# Altium footprint library clusterhead.PcbLib: 75 footprints (part 3 of 5)
Each footprint in its own frame and in the unit in brackets; x right, y up, seen from the top. Pads: shape width x height; smd on the part's side, far side on the other; paste and mask are expansions set on the pad; w line width, h text height; cw(c..) or ccw(c..) is an arc to the next point about the centre after c.
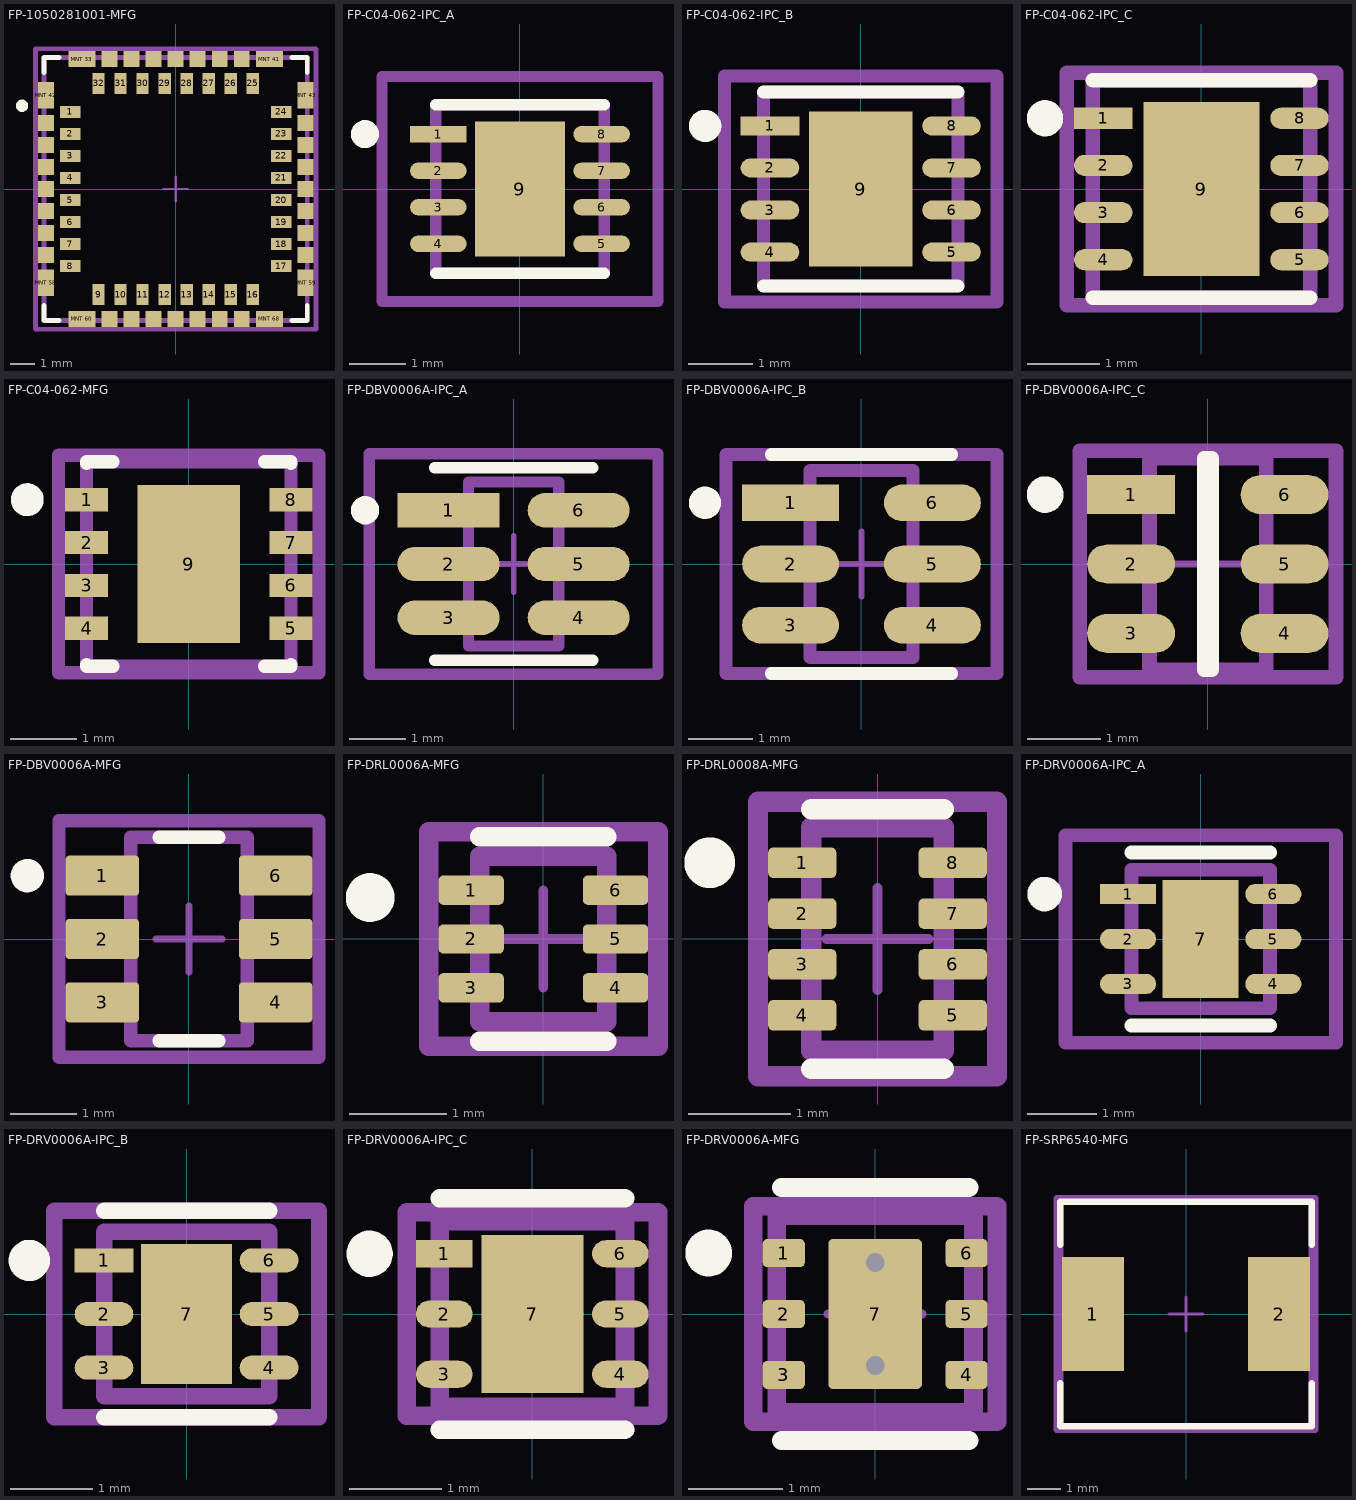
[diagram p2: the footprints below, top view; thin cyan lines are the x and y axes]

## FP-1050281001-MFG [mm]
pads (68):
  rect 0.84x0.5 smd paste+0 mask+0: 1(-4.31,3.15) 2(-4.31,2.25) 3(-4.31,1.35) 4(-4.31,0.45) 5(-4.31,-0.45) 6(-4.31,-1.35) 7(-4.31,-2.25) 8(-4.31,-3.15) 17(4.31,-3.15) 18(4.31,-2.25) 19(4.31,-1.35) 20(4.31,-0.45) 21(4.31,0.45) 22(4.31,1.35) 23(4.31,2.25) 24(4.31,3.15)
  rect 0.5x0.84 smd paste+0 mask+0: 9(-3.15,-4.31) 10(-2.25,-4.31) 11(-1.35,-4.31) 12(-0.45,-4.31) 13(0.45,-4.31) 14(1.35,-4.31) 15(2.25,-4.31) 16(3.15,-4.31) 25(3.15,4.31) 26(2.25,4.31) 27(1.35,4.31) 28(0.45,4.31) 29(-0.45,4.31) 30(-1.35,4.31) 31(-2.25,4.31) 32(-3.15,4.31)
  rect 1.1x0.65 smd paste+0 mask+0: "MNT 33"(-3.83,5.305) "MNT 41"(3.83,5.305) "MNT 60"(-3.83,-5.305) "MNT 68"(3.83,-5.305)
  rect 0.65x0.65 smd paste+0 mask+0: "MNT 34"(-2.7,5.305) "MNT 35"(-1.8,5.305) "MNT 36"(-0.9,5.305) "MNT 37"(0,5.305) "MNT 38"(0.9,5.305) "MNT 39"(1.8,5.305) "MNT 40"(2.7,5.305) "MNT 44"(-5.305,2.7) "MNT 45"(5.305,2.7) "MNT 46"(-5.305,1.8) "MNT 47"(5.305,1.8) "MNT 48"(-5.305,0.9) "MNT 49"(5.305,0.9) "MNT 50"(-5.305,0) "MNT 51"(5.305,0) "MNT 52"(-5.305,-0.9) "MNT 53"(5.305,-0.9) "MNT 54"(-5.305,-1.8) "MNT 55"(5.305,-1.8) "MNT 56"(-5.305,-2.7) "MNT 57"(5.305,-2.7) "MNT 61"(-2.7,-5.305) "MNT 62"(-1.8,-5.305) "MNT 63"(-0.9,-5.305) "MNT 64"(0,-5.305) "MNT 65"(0.9,-5.305) "MNT 66"(1.8,-5.305) "MNT 67"(2.7,-5.305)
  rect 0.65x1.1 smd paste+0 mask+0: "MNT 42"(-5.305,3.83) "MNT 43"(5.305,3.83) "MNT 58"(-5.305,-3.83) "MNT 59"(5.305,-3.83)
Top Overlay:
  circle w0.25: c-6.275,3.4 r0.125
  lines w0.2: -5.375,-4.755 -5.375,-5.375 -4.755,-5.375 ; -5.375,4.755 -5.375,5.375 -4.755,5.375 ; 4.755,-5.375 5.375,-5.375 5.375,-4.755 ; 4.755,5.375 5.375,5.375 5.375,4.755
Top Courtyard:
  lines w0.2: -5.73,-5.73 -5.73,5.73 5.73,5.73 5.73,-5.73 -5.73,-5.73
Top 3D Body:
  lines w0.2: -5.375,-5.375 -5.375,5.375 5.375,5.375 5.375,-5.375 -5.375,-5.375
Top Assembly:
  lines w0.2: -5.73,-5.73 -5.73,5.73 5.73,5.73 5.73,-5.73 -5.73,-5.73
  text ".Designator" at 0,0.188 h1
Top Component Center:
  lines w0.1: -0.5,0 0.5,0 ; 0,-0.5 0,0.5
3D body "Conn_Molex_1050281001_eec.STEP": height 0.25, standoff 0, extent -5.73,-5.73 5.73,5.73

## FP-C04-062-IPC_A [mm]
pads (9):
  rect 1.006x0.292 smd paste+0 mask+0: 1(-1.453,0.975)
  rrect100% 1.006x0.292 smd paste+0 mask+0: 2(-1.453,0.325) 3(-1.453,-0.325) 4(-1.453,-0.975) 5(1.453,-0.975) 6(1.453,-0.325) 7(1.453,0.325) 8(1.453,0.975)
  rect 1.6x2.4 smd paste-1000 mask+0: 9(0,0)
Top Overlay:
  circle w0.25: c-2.756,0.975 r0.125
  lines w0.2: -1.5,-1.5 1.5,-1.5 ; -1.5,1.5 1.5,1.5
Top Paste:
  rectangle: -0.451,-0.851 0.451,0.851
Top Courtyard:
  lines w0.2: -2.456,-2 -2.456,2 2.456,2 2.456,-2 -2.456,-2
Top 3D Body:
  lines w0.2: -1.5,-1.5 -1.5,1.5 1.5,1.5 1.5,-1.5 -1.5,-1.5
Top Assembly:
  lines w0.2: -2.456,-2 -2.456,2 2.456,2 2.456,-2 -2.456,-2
  text ".Designator" at 0,0 h1
Top Component Center:
  lines w0.1: -0.5,0 0.5,0 ; 0,-0.5 0,0.5
3D body "IC_Microchip_Technology_MCP2544FDT-H-MF_eec.STEP": height 0.25, standoff 0, extent -2.456,-2 2.456,2

## FP-C04-062-IPC_B [mm]
pads (9):
  rect 0.906x0.292 smd paste+0 mask+0: 1(-1.403,0.975)
  rrect100% 0.906x0.292 smd paste+0 mask+0: 2(-1.403,0.325) 3(-1.403,-0.325) 4(-1.403,-0.975) 5(1.403,-0.975) 6(1.403,-0.325) 7(1.403,0.325) 8(1.403,0.975)
  rect 1.6x2.4 smd paste-1000 mask+0: 9(0,0)
Top Overlay:
  circle w0.25: c-2.406,0.975 r0.125
  lines w0.2: -1.5,-1.5 1.5,-1.5 ; -1.5,1.5 1.5,1.5
Top Paste:
  rectangle: -0.451,-0.851 0.451,0.851
Top Courtyard:
  lines w0.2: -2.106,-1.75 2.106,-1.75 2.106,1.75 -2.106,1.75 -2.106,-1.75
Top 3D Body:
  lines w0.2: -1.5,-1.5 1.5,-1.5 1.5,1.5 -1.5,1.5 -1.5,-1.5
Top Assembly:
  lines w0.2: -2.106,-1.75 2.106,-1.75 2.106,1.75 -2.106,1.75 -2.106,-1.75
  text ".Designator" at 0,0 h1
Top Component Center:
  lines w0.1: -0.5,0 0.5,0 ; 0,-0.5 0,0.5
3D body "IC_Microchip_Technology_MCP2544FDT-H-MF_eec.STEP": height 0.25, standoff 0, extent -2.106,-1.75 2.106,1.75

## FP-C04-062-IPC_C [mm]
pads (9):
  rect 0.806x0.292 smd paste+0 mask+0: 1(-1.353,0.975)
  rrect100% 0.806x0.292 smd paste+0 mask+0: 2(-1.353,0.325) 3(-1.353,-0.325) 4(-1.353,-0.975) 5(1.353,-0.975) 6(1.353,-0.325) 7(1.353,0.325) 8(1.353,0.975)
  rect 1.6x2.4 smd paste-1000 mask+0: 9(0,0)
Top Overlay:
  circle w0.25: c-2.156,0.975 r0.125
  lines w0.2: -1.5,-1.5 1.5,-1.5 ; -1.5,1.5 1.5,1.5
Top Paste:
  rectangle: -0.451,-0.851 0.451,0.851
Top Courtyard:
  lines w0.2: -1.856,-1.6 1.856,-1.6 1.856,1.6 -1.856,1.6 -1.856,-1.6
Top 3D Body:
  lines w0.2: -1.5,-1.5 1.5,-1.5 1.5,1.5 -1.5,1.5 -1.5,-1.5
Top Assembly:
  lines w0.2: -1.856,-1.6 1.856,-1.6 1.856,1.6 -1.856,1.6 -1.856,-1.6
  text ".Designator" at 0,0 h1
Top Component Center:
  lines w0.1: -0.5,0 0.5,0 ; 0,-0.5 0,0.5
3D body "IC_Microchip_Technology_MCP2544FDT-H-MF_eec.STEP": height 0.25, standoff 0, extent -1.856,-1.6 1.856,1.6

## FP-C04-062-MFG [mm]
pads (9):
  rect 0.65x0.35 smd paste+0 mask+0: 1(-1.55,0.975) 2(-1.55,0.325) 3(-1.55,-0.325) 4(-1.55,-0.975) 5(1.55,-0.975) 6(1.55,-0.325) 7(1.55,0.325) 8(1.55,0.975)
  rect 1.55x2.4 smd paste+0 mask+0: 9(0,0)
Top Overlay:
  circle w0.25: c-2.45,0.975 r0.125
  lines w0.2: -1.55,-1.525 -1.55,-1.55 -1.15,-1.55 ; -1.55,1.525 -1.55,1.55 -1.15,1.55 ; 1.15,-1.55 1.55,-1.55 1.55,-1.525 ; 1.15,1.55 1.55,1.55 1.55,1.525
Top Courtyard:
  lines w0.2: -1.975,-1.65 1.975,-1.65 1.975,1.65 -1.975,1.65 -1.975,-1.65
Top 3D Body:
  lines w0.2: -1.55,-1.55 1.55,-1.55 1.55,1.55 -1.55,1.55 -1.55,-1.55
Top Assembly:
  lines w0.2: -1.975,-1.65 1.975,-1.65 1.975,1.65 -1.975,1.65 -1.975,-1.65
  text ".Designator" at 0,0.188 h1
Top Component Center:
  lines w0.1: -0.5,0 0.5,0 ; 0,-0.5 0,0.5
3D body "IC_Microchip_Technology_MCP2544FDT-H-MF_eec.STEP": height 0.25, standoff 0, extent -1.975,-1.65 1.975,1.65

## FP-DBV0006A-IPC_A [mm]
pads (6):
  rect 1.805x0.61 smd paste+0 mask+0: 1(-1.15,0.95)
  rrect100% 1.805x0.61 smd paste+0 mask+0: 2(-1.15,0) 3(-1.15,-0.95) 4(1.15,-0.95) 5(1.15,0) 6(1.15,0.95)
Top Overlay:
  circle w0.25: c-2.628,0.95 r0.125
  lines w0.2: -1.4,-1.7 1.4,-1.7 ; -1.4,1.7 1.4,1.7
Top Courtyard:
  lines w0.2: -2.553,-1.95 -2.553,1.95 2.553,1.95 2.553,-1.95 -2.553,-1.95
Top 3D Body:
  lines w0.2: -0.8,-1.45 -0.8,1.45 0.8,1.45 0.8,-1.45 -0.8,-1.45
Top Assembly:
  lines w0.2: -2.553,-1.95 -2.553,1.95 2.553,1.95 2.553,-1.95 -2.553,-1.95
  text ".Designator" at 0,0.188 h1
Top Component Center:
  lines w0.1: -0.5,0 0.5,0 ; 0,-0.5 0,0.5
3D body "IC_Texas_Instruments_SN74LVC1G97DBVR_eec.STEP": height 0.25, standoff 0, extent -2.553,-1.95 2.553,1.95

## FP-DBV0006A-IPC_B [mm]
pads (6):
  rect 1.505x0.57 smd paste+0 mask+0: 1(-1.1,0.95)
  rrect100% 1.505x0.57 smd paste+0 mask+0: 2(-1.1,0) 3(-1.1,-0.95) 4(1.1,-0.95) 5(1.1,0) 6(1.1,0.95)
Top Overlay:
  circle w0.25: c-2.428,0.95 r0.125
  lines w0.2: -1.4,-1.7 1.4,-1.7 ; -1.4,1.7 1.4,1.7
Top Courtyard:
  lines w0.2: -2.103,-1.7 2.103,-1.7 2.103,1.7 -2.103,1.7 -2.103,-1.7
Top 3D Body:
  lines w0.2: -0.8,-1.45 0.8,-1.45 0.8,1.45 -0.8,1.45 -0.8,-1.45
Top Assembly:
  lines w0.2: -2.103,-1.7 2.103,-1.7 2.103,1.7 -2.103,1.7 -2.103,-1.7
  text ".Designator" at 0,0.188 h1
Top Component Center:
  lines w0.1: -0.5,0 0.5,0 ; 0,-0.5 0,0.5
3D body "IC_Texas_Instruments_SN74LVC1G97DBVR_eec.STEP": height 0.25, standoff 0, extent -2.103,-1.7 2.103,1.7

## FP-DBV0006A-IPC_C [mm]
pads (6):
  rect 1.205x0.53 smd paste+0 mask+0: 1(-1.05,0.95)
  rrect100% 1.205x0.53 smd paste+0 mask+0: 2(-1.05,0) 3(-1.05,-0.95) 4(1.05,-0.95) 5(1.05,0) 6(1.05,0.95)
Top Overlay:
  circle w0.25: c-2.228,0.95 r0.125
  lines w0.2: -0.052,-1.45 -0.052,1.45 0.052,1.45 0.052,-1.45 -0.052,-1.45
Top Courtyard:
  lines w0.2: -1.753,-1.55 1.753,-1.55 1.753,1.55 -1.753,1.55 -1.753,-1.55
Top 3D Body:
  lines w0.2: -0.8,-1.45 0.8,-1.45 0.8,1.45 -0.8,1.45 -0.8,-1.45
Top Assembly:
  lines w0.2: -1.753,-1.55 1.753,-1.55 1.753,1.55 -1.753,1.55 -1.753,-1.55
  text ".Designator" at 0,0.188 h1
Top Component Center:
  lines w0.1: -0.5,0 0.5,0 ; 0,-0.5 0,0.5
3D body "IC_Texas_Instruments_SN74LVC1G97DBVR_eec.STEP": height 0.25, standoff 0, extent -1.753,-1.55 1.753,1.55

## FP-DBV0006A-MFG [mm]
pads (6):
  rrect17% 1.1x0.6 smd paste+0 mask+0: 1(-1.3,0.95) 2(-1.3,0) 3(-1.3,-0.95) 4(1.3,-0.95) 5(1.3,0) 6(1.3,0.95)
Top Overlay:
  circle w0.25: c-2.425,0.95 r0.125
  lines w0.2: -0.45,-1.525 0.45,-1.525 ; -0.45,1.525 0.45,1.525
Top Courtyard:
  lines w0.2: -1.95,-1.775 -1.95,1.775 1.95,1.775 1.95,-1.775 -1.95,-1.775
Top 3D Body:
  lines w0.2: -0.875,-1.525 -0.875,1.525 0.875,1.525 0.875,-1.525 -0.875,-1.525
Top Assembly:
  lines w0.2: -1.95,-1.775 -1.95,1.775 1.95,1.775 1.95,-1.775 -1.95,-1.775
  text ".Designator" at 0,0.188 h1
Top Component Center:
  lines w0.1: -0.5,0 0.5,0 ; 0,-0.5 0,0.5
3D body "IC_Texas_Instruments_SN74LVC1G97DBVR_eec.STEP": height 0.25, standoff 0, extent -1.95,-1.775 1.95,1.775

## FP-DRL0006A-MFG [mm]
pads (6):
  rrect33% 0.67x0.3 smd paste+0 mask+0: 1(-0.74,0.5) 2(-0.74,0) 3(-0.74,-0.5) 4(0.74,-0.5) 5(0.74,0) 6(0.74,0.5)
Top Overlay:
  circle w0.25: c-1.775,0.425 r0.125
  lines w0.2: -0.65,-1.05 0.65,-1.05 ; -0.65,1.05 0.65,1.05
Top Courtyard:
  lines w0.2: -1.175,-1.1 -1.175,1.1 1.175,1.1 1.175,-1.1 -1.175,-1.1
Top 3D Body:
  lines w0.2: -0.65,-0.85 -0.65,0.85 0.65,0.85 0.65,-0.85 -0.65,-0.85
Top Assembly:
  lines w0.2: -1.175,-1.1 -1.175,1.1 1.175,1.1 1.175,-1.1 -1.175,-1.1
  text ".Designator" at 0,0.188 h1
Top Component Center:
  lines w0.1: -0.5,0 0.5,0 ; 0,-0.5 0,0.5
3D body "Diode_Texas_Instruments_TPD2E1B06DRLR_eec.STEP": height 0.25, standoff 0, extent -1.175,-1.1 1.175,1.1

## FP-DRL0008A-MFG [mm]
pads (8):
  rrect33% 0.67x0.3 smd paste+0 mask+0: 1(-0.74,0.75) 2(-0.74,0.25) 3(-0.74,-0.25) 4(-0.74,-0.75) 5(0.74,-0.75) 6(0.74,-0.25) 7(0.74,0.25) 8(0.74,0.75)
Top Overlay:
  circle w0.25: c-1.65,0.75 r0.125
  lines w0.2: -0.65,-1.275 0.65,-1.275 ; -0.65,1.275 0.65,1.275
Top Courtyard:
  lines w0.2: -1.175,-1.35 -1.175,1.35 1.175,1.35 1.175,-1.35 -1.175,-1.35
Top 3D Body:
  lines w0.2: -0.65,-1.1 -0.65,1.1 0.65,1.1 0.65,-1.1 -0.65,-1.1
Top Assembly:
  lines w0.2: -1.175,-1.35 -1.175,1.35 1.175,1.35 1.175,-1.35 -1.175,-1.35
  text ".Designator" at 0,0.188 h1
Top Component Center:
  lines w0.1: -0.5,0 0.5,0 ; 0,-0.5 0,0.5
3D body "IC_Texas_Instruments_TPS628501QDRLRQ1_eec.STEP": height 0.25, standoff 0, extent -1.175,-1.35 1.175,1.35

## FP-DRV0006A-IPC_A [mm]
pads (7):
  rect 0.811x0.292 smd paste+0 mask+0: 1(-1.051,0.65)
  rrect100% 0.811x0.292 smd paste+0 mask+0: 2(-1.051,0) 3(-1.051,-0.65) 4(1.051,-0.65) 5(1.051,0) 6(1.051,0.65)
  rect 1.1x1.7 smd paste-1000 mask+0: 7(0,0)
Top Overlay:
  circle w0.25: c-2.256,0.65 r0.125
  lines w0.2: -1,-1.25 1,-1.25 ; -1,1.25 1,1.25
Top Paste:
  rectangle: -0.308,-0.608 0.308,0.608
Top Courtyard:
  lines w0.2: -1.956,-1.5 1.956,-1.5 1.956,1.5 -1.956,1.5 -1.956,-1.5
Top 3D Body:
  lines w0.2: -1,-1 1,-1 1,1 -1,1 -1,-1
Top Assembly:
  lines w0.2: -1.956,-1.5 1.956,-1.5 1.956,1.5 -1.956,1.5 -1.956,-1.5
  text ".Designator" at 0,0 h1
Top Component Center:
  lines w0.1: -0.5,0 0.5,0 ; 0,-0.5 0,0.5
3D body "IC_Texas_Instruments_LP5912Q3_3DRVRQ1_eec.STEP": height 0.25, standoff 0, extent -1.956,-1.5 1.956,1.5

## FP-DRV0006A-IPC_B [mm]
pads (7):
  rect 0.711x0.292 smd paste+0 mask+0: 1(-1.001,0.65)
  rrect100% 0.711x0.292 smd paste+0 mask+0: 2(-1.001,0) 3(-1.001,-0.65) 4(1.001,-0.65) 5(1.001,0) 6(1.001,0.65)
  rect 1.1x1.7 smd paste-1000 mask+0: 7(0,0)
Top Overlay:
  circle w0.25: c-1.906,0.65 r0.125
  lines w0.2: -1,-1.25 1,-1.25 ; -1,1.25 1,1.25
Top Paste:
  rectangle: -0.308,-0.608 0.308,0.608
Top Courtyard:
  lines w0.2: -1.606,-1.25 1.606,-1.25 1.606,1.25 -1.606,1.25 -1.606,-1.25
Top 3D Body:
  lines w0.2: -1,-1 1,-1 1,1 -1,1 -1,-1
Top Assembly:
  lines w0.2: -1.606,-1.25 1.606,-1.25 1.606,1.25 -1.606,1.25 -1.606,-1.25
  text ".Designator" at 0,0 h1
Top Component Center:
  lines w0.1: -0.5,0 0.5,0 ; 0,-0.5 0,0.5
3D body "IC_Texas_Instruments_LP5912Q3_3DRVRQ1_eec.STEP": height 0.25, standoff 0, extent -1.606,-1.25 1.606,1.25

## FP-DRV0006A-IPC_C [mm]
pads (7):
  rect 0.611x0.292 smd paste+0 mask+0: 1(-0.951,0.65)
  rrect100% 0.611x0.292 smd paste+0 mask+0: 2(-0.951,0) 3(-0.951,-0.65) 4(0.951,-0.65) 5(0.951,0) 6(0.951,0.65)
  rect 1.1x1.7 smd paste-1000 mask+0: 7(0,0)
Top Overlay:
  circle w0.25: c-1.756,0.65 r0.125
  lines w0.2: -1,-1.25 1,-1.25 ; -1,1.25 1,1.25
Top Paste:
  rectangle: -0.308,-0.608 0.308,0.608
Top Courtyard:
  lines w0.2: -1.356,-1.1 1.356,-1.1 1.356,1.1 -1.356,1.1 -1.356,-1.1
Top 3D Body:
  lines w0.2: -1,-1 1,-1 1,1 -1,1 -1,-1
Top Assembly:
  lines w0.2: -1.356,-1.1 1.356,-1.1 1.356,1.1 -1.356,1.1 -1.356,-1.1
  text ".Designator" at 0,0 h1
Top Component Center:
  lines w0.1: -0.5,0 0.5,0 ; 0,-0.5 0,0.5
3D body "IC_Texas_Instruments_LP5912Q3_3DRVRQ1_eec.STEP": height 0.25, standoff 0, extent -1.356,-1.1 1.356,1.1

## FP-DRV0006A-MFG [mm]
pads (7):
  rrect33% 0.45x0.3 smd paste+0 mask+0: 1(-0.975,0.65) 2(-0.975,0) 3(-0.975,-0.65) 4(0.975,-0.65) 5(0.975,0) 6(0.975,0.65)
  rrect10% 1x1.6 smd paste-1000 mask+0: 7(0,0)
via 0,-0.55 diameter 0.5 hole 0.2
via 0,0.55 diameter 0.5 hole 0.2
Top Overlay:
  circle w0.25: c-1.775,0.65 r0.125
  lines w0.2: -1,-1.35 1,-1.35 ; -1,1.35 1,1.35
Top Paste:
  region: -0.5,-0.15 -0.5,-0.14 -0.492,-0.122 -0.478,-0.108 -0.46,-0.1 -0.45,-0.1 0.45,-0.1 0.46,-0.1 0.478,-0.108 0.492,-0.122 0.5,-0.14 0.5,-0.15 0.5,-0.75 0.5,-0.76 0.492,-0.778 0.478,-0.792 0.46,-0.8 0.45,-0.8 -0.45,-0.8 -0.46,-0.8 -0.478,-0.792 -0.492,-0.778 -0.5,-0.76 -0.5,-0.75
  region: 0.45,0.8 0.46,0.8 0.478,0.792 0.492,0.778 0.5,0.76 0.5,0.75 0.5,0.15 0.5,0.14 0.492,0.122 0.478,0.108 0.46,0.1 0.45,0.1 -0.45,0.1 -0.46,0.1 -0.478,0.108 -0.492,0.122 -0.5,0.14 -0.5,0.15 -0.5,0.75 -0.5,0.76 -0.492,0.778 -0.478,0.792 -0.46,0.8 -0.45,0.8
Top Courtyard:
  lines w0.2: -1.3,-1.15 -1.3,1.15 1.3,1.15 1.3,-1.15 -1.3,-1.15
Top 3D Body:
  lines w0.2: -1.05,-1.05 -1.05,1.05 1.05,1.05 1.05,-1.05 -1.05,-1.05
Top Assembly:
  lines w0.2: -1.3,-1.15 -1.3,1.15 1.3,1.15 1.3,-1.15 -1.3,-1.15
  text ".Designator" at 0,0.188 h1
Top Component Center:
  lines w0.1: -0.5,0 0.5,0 ; 0,-0.5 0,0.5
3D body "IC_Texas_Instruments_LP5912Q3_3DRVRQ1_eec.STEP": height 0.25, standoff 0, extent -1.3,-1.15 1.3,1.15

## FP-SRP6540-MFG [mm]
pads (2):
  rect 1.85x3.4 smd paste+0 mask+0: 1(-2.775,0) 2(2.775,0)
Top Overlay:
  lines w0.2: -3.75,-2.075 -3.75,-3.35 3.75,-3.35 3.75,-2.075 ; -3.75,2.075 -3.75,3.35 3.75,3.35 3.75,2.075
Top Courtyard:
  lines w0.2: -3.85,-3.45 -3.85,3.45 3.85,3.45 3.85,-3.45 -3.85,-3.45
Top 3D Body:
  lines w0.2: -3.75,-3.35 -3.75,3.35 3.75,3.35 3.75,-3.35 -3.75,-3.35
Top Assembly:
  lines w0.2: -3.85,-3.45 -3.85,3.45 3.85,3.45 3.85,-3.45 -3.85,-3.45
  text ".Designator" at 0,0.188 h1
Top Component Center:
  lines w0.1: -0.5,0 0.5,0 ; 0,-0.5 0,0.5
3D body "Ind_Bourns_SRP6540-1R5M_eec.STEP": height 0.25, standoff 0, extent -3.85,-3.45 3.85,3.45